# Altium schematic symbol library Power_vac.SCHLIB: 48 symbols
Pins are listed as number, name and electrical type; pins without a type are passive.

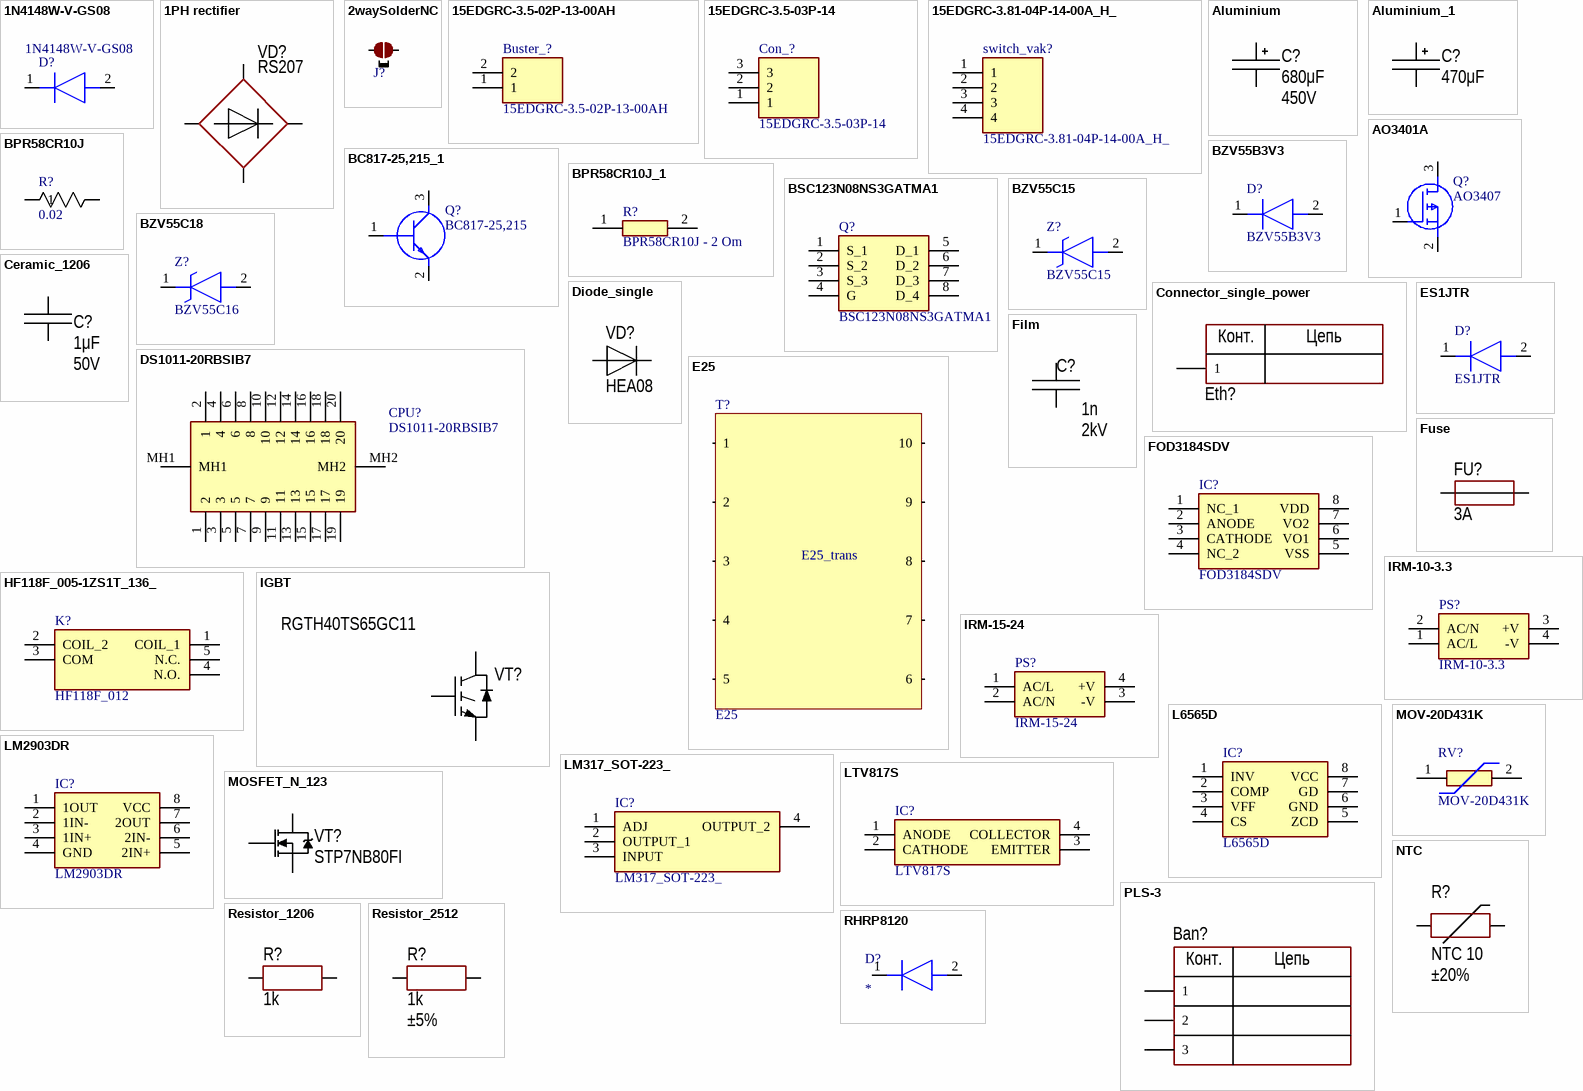
[diagram p0: symbols 1N4148W-V-GS08 to RHRP8120]

## 1N4148W-V-GS08
designator D?
Diode; Manufacturer_Name: Vishay; Datasheet Link: https://us.rs-online.com/m/d/a2789c8794cb0c42ced29f2dd8571f3c.pdf; Height: 1.35mm; Manufacturer_Part_Number: 1N4148W-V-GS08; Mouser Part Number: 625-1N4148W-V; Mouser Price/Stock: https://www.mouser.co.uk/ProductDetail/Vishay-Semiconductors/1N4148W-V-GS08?qs=TNTIDjy6APrS%2Fdgq1RSs3A%3D%3D; Arrow Part Number: 1N4148W-V-GS08; Arrow Price/Stock: https://www.arrow.com/en/products/1n4148w-v-gs08/vishay
footprint 1N4148WVGS08
pins: 1 K, 2 A

## 1PH rectifier
designator VD?  PartNumber: RS207
Manufacturer: Comchip Technology; ValueManufacturerPartNumber: Single phase rectifier, 600V, 2A, 1.1V, 4-SMD, -55...+150°C; TypeDiode: Single phase rectifier; Voltage: 600V; Current: 2A; VoltageDrop: 1.1V; Package: 4-SMD; HelpURL: https://www.digikey.com/product-detail/en/comchip-technology/DF206ST-G/641-1425-1-ND/2208797; Temperature: -55...+150°C
footprint DIODE: CD-MBL2
footprint DIODE: DF206S-G
footprint DIODE: GBU (SMD Diode Bridge)
footprint DIODE: KBU6M
footprint DIODE: GBU (90 deg) (SMD Diode Bridge)
pins: 1, 2, 3, 4

## 2waySolderNC
designator J?, comment 2 way net solder junction - Normally Connected  (value not drawn)  (no BOM)
ComponentLink1URL: http://www.edatools.cz/addons; ComponentLink1Description: Source
footprint 2waySolder_NC (2 way net solder junction - Normally Connected)
pins: 1, 2

## 15EDGRC-3.5-02P-13-00AH
designator Buster_?
Connector; Manufacturer_Name: Degson; Datasheet Link: https://www.tme.eu/Document/c7e2facf434c6541c93efde757aaf5e6/607.pdf; Height: 7mm; Manufacturer_Part_Number: 15EDGRC-3.5-02P-13-00AH
footprint 15EDGRC3502P1300AH
pins: 1, 2

## 15EDGRC-3.5-03P-14
designator Con_?
Connector; Manufacturer_Name: Degson; Datasheet Link: https://www.degson.com/content/details_552_4151737.html?lang=en; Height: 7.46mm; Manufacturer_Part_Number: 15EDGRC-3.5-03P-14
footprint 15EDGRC3503P14
pins: 1, 2, 3

## 15EDGRC-3.81-04P-14-00A_H_
designator switch_vak?
Connector; Manufacturer_Name: Degson; Manufacturer_Part_Number: 15EDGRC-3.81-04P-14-00A(H); Datasheet Link: https://datasheet.octopart.com/15EDGRC-3.81-04P-14-00A%28H%29-Degson-datasheet-17801160.pdf; Height: 7.54mm
footprint SHDRRA4W80P0X381_1X4_1603X920X754P
pins: 1, 2, 3, 4

## Aluminium
designator C?  value 680μF  Voltage: 450V
Manufacturer: Wurth; PartNumber: 860080475013; ValueManufacturerPartNumber: Aluminium capacitor, 680μF, 450V, ±20%, 54mOhm, 14x10x5 mm, -55...+105°C; TypeCapacitor: Aluminium capacitor; Tolerance: ±20%; Impedance: 54mOhm; Package: 14x10x5 mm; HelpURL: https://www.digikey.com/product-detail/en/wurth-electronics-inc/860080475013/732-9029-1-ND/5728972; Temperature: -55...+105°C
footprint CAP: D5C2H11
footprint CAP: D6.3C2.5H11
footprint CAP: D6.3C2.5H16
footprint CAP: D8C3.5H12
footprint CAP: D10C5H12.5
footprint CAP: D10C5H20
footprint CAP: D10C5H16
footprint CAP: D13C5H20
footprint CAP: D16C7.5H25
footprint CAP: D16C7.5H31.5
footprint CAP: D18C7.5H25
footprint CAP: D18C7.5H40
footprint CAP: D22C10H25
footprint CAP: D25C10H50
footprint CAP: D30C10H37
footprint CAP: D30C10.5H47
footprint CAP: D35C10H40
footprint CAP: D35C10.5H50
footprint CAP: SMD D6.3A6.6H7.7
footprint CAP: D18C7.5H32
footprint CAP: D18C7.5H32 (H)
pins: 1, 2

## Aluminium_1
designator C?  value 470μF
Manufacturer: Wurth; PartNumber: 860080475013; ValueManufacturerPartNumber: Aluminium capacitor, 470μF, 25V, ±20%, 54mOhm, 14x10x5 mm, -55...+105°C; TypeCapacitor: Aluminium capacitor; Tolerance: ±20%; Impedance: 54mOhm; Voltage: 25V; Package: 14x10x5 mm; HelpURL: https://www.digikey.com/product-detail/en/wurth-electronics-inc/860080475013/732-9029-1-ND/5728972; Temperature: -55...+105°C
footprint CAP: D5C2H11
footprint CAP: D6.3C2.5H11
footprint CAP: D6.3C2.5H16
footprint CAP: D8C3.5H12
footprint CAP: D10C5H12.5
footprint CAP: D10C5H20
footprint CAP: D10C5H16
footprint CAP: D13C5H20
footprint CAP: D16C7.5H25
footprint CAP: D16C7.5H31.5
footprint CAP: D18C7.5H25
footprint CAP: D18C7.5H40
footprint CAP: D22C10H25
footprint CAP: D25C10H50
footprint CAP: D30C10H37
footprint CAP: D30C10.5H47
footprint CAP: D35C10H40
footprint CAP: D35C10.5H50
footprint CAP: SMD D6.3A6.6H7.7
footprint CAP: D18C7.5H32
footprint CAP: D18C7.5H32 (H)
pins: 1, 2

## AO3401A
designator Q?, comment AO3407
MOSFET (P-Channel); Manufacturer_Name: Alpha & Omega Semiconductors; Manufacturer_Part_Number: AO3401A; Datasheet Link: http://www.aosmd.com/pdfs/datasheet/AO3401A.pdf; Height: 1.25mm; Arrow Part Number: AO3401A; Arrow Price/Stock: https://www.arrow.com/en/products/ao3401a/alpha-and-omega-semiconductor?utm_currency=USD&region=nac
footprint SOT95P280X125-3N
pins: 1 G, 2 S, 3 D

## BC817-25,215_1
designator Q?, comment BC817-25,215
Transistor BJT NPN; Manufacturer_Name: Nexperia; Datasheet Link: https://assets.nexperia.com/documents/data-sheet/BC817_SER.pdf; Height: 1.1mm; Manufacturer_Part_Number: BC817-25,215; Mouser Part Number: 771-BC817-25-T/R; Mouser Price/Stock: https://www.mouser.co.uk/ProductDetail/Nexperia/BC817-25215?qs=me8TqzrmIYUj67JkTBzlfg%3D%3D; Arrow Part Number: BC817-25,215; Arrow Price/Stock: https://www.arrow.com/en/products/bc817-25215/nexperia?region=nac
footprint BC81725215
pins: 1 B, 2 E, 3 C

## BPR58CR10J
designator R?, comment 0.02
No Description Available; Manufacturer_Name: KOA Speer; Manufacturer_Part_Number: BPR58CR10J; Type: Through Hole Resistors; Copyright: Copyright (C) 2026 Ultra Librarian. All rights reserved.
footprint RES_BPR58-STRAIGHT_KOA
pins: 1, 2

## BPR58CR10J_1
designator R?, comment BPR58CR10J - 2 Om
Resistor; Manufacturer_Name: KOA Speer; Datasheet Link: https://www.koaspeer.com/catimages/Products/BPR/BPR.pdf; Height: 19mm; Manufacturer_Part_Number: BPR58CR10J; Mouser Part Number: 660-BPR58CR10J; Mouser Price/Stock: https://www.mouser.co.uk/ProductDetail/KOA-Speer/BPR58CR10J?qs=c3C3yipULq1EyCkbnj3nTQ%3D%3D; Arrow Part Number: BPR58CR10J; Arrow Price/Stock: https://www.arrow.com/en/products/bpr58cr10j/koa-speer-electronics.html?utm_currency=USD&region=nac
footprint BPR58CR10J
pins: 1, 2

## BSC123N08NS3GATMA1
designator Q?
MOSFET (N-Channel); Manufacturer_Name: Infineon; Datasheet Link: https://www.infineon.com/dgdl/Infineon-BSC123N08NS3G-DS-v02_05-en.pdf?fileId=db3a30431add1d95011ae80eb8555625; Manufacturer_Part_Number: BSC123N08NS3GATMA1; Mouser Part Number: 726-BSC123N08NS3GATM; Mouser Price/Stock: https://www.mouser.co.uk/ProductDetail/Infineon-Technologies/BSC123N08NS3GATMA1?qs=K00xGehIljtQ0xUH5qROpA%3D%3D; Arrow Part Number: BSC123N08NS3GATMA1; Arrow Price/Stock: https://www.arrow.com/en/products/bsc123n08ns3gatma1/infineon-technologies-ag.html?utm_currency=USD&region=asia
footprint PG-TDSON-8
pins: 1 S_1, 2 S_2, 3 S_3, 4 G, 5 D_1, 6 D_2, 7 D_3, 8 D_4

## BZV55B3V3
designator D?
Diode; Manufacturer_Name: Nexperia; Datasheet Link: https://assets.nexperia.com/documents/data-sheet/BZV55_SER.pdf; Height: 1.6mm; Manufacturer_Part_Number: BZV55B3V3
footprint BZV55B3V3
pins: 1 K, 2 A

## BZV55C15
designator Z?
Zener Diode; Manufacturer_Name: Microsemi Corporation; Datasheet Link: https://www.mouser.com/datasheet/2/268/BZV55_C2V4_C75-1593780.pdf; Manufacturer_Part_Number: BZV55C15; Mouser Part Number: 494-BZV55C15; Mouser Price/Stock: https://www.mouser.co.uk/ProductDetail/Microchip-Microsemi/BZV55C15/?qs=TXMzd3F6Eykee5C9dglsnA%3D%3D; Arrow Part Number: BZV55C15; Arrow Price/Stock: https://www.arrow.com/en/products/bzv55c15/microsemi
footprint DO-213AA
pins: 1 K, 2 A

## BZV55C18
designator Z?, comment BZV55C16
Zener Diode; Manufacturer_Name: Microchip; Manufacturer_Part_Number: BZV55C18; Datasheet Link: https://www.microsemi.com/document-portal/doc_download/8298-bzv55-c2v4-c75-datasheet; Height: 1.7mm; Mouser Part Number: 494-BZV55C18; Mouser Price/Stock: https://www.mouser.co.uk/ProductDetail/Microchip-Technology/BZV55C18?qs=w%2Fv1CP2dgqosS2q5rh%252BhPQ%3D%3D; Arrow Part Number: BZV55C18; Arrow Price/Stock: https://www.arrow.com/en/products/bzv55c18/microchip-technology.html?utm_currency=USD&region=nac
footprint BZV55C18
pins: 1 K, 2 A

## Ceramic_1206
designator C?  value 1μF  Voltage: 50V
Manufacturer: Yageo; PartNumber: CC1206KRX7R9BB104; ValueManufacturerPartNumber: Ceramic capacitor, 1μF, X7R, ±10%, 50V, 1206, -55...+125°C; TypeCapacitor: Ceramic capacitor; Tolerance: ±10%; TypeDielectric: X7R; Package: 1206; HelpURL: https://www.digikey.com/product-detail/en/yageo/CC1206KRX7R9BB104/311-1179-1-ND/303089; Temperature: -55...+125°C
footprint CAP: 1206
pins: 1, 2

## Connector_single_power
designator Eth?
ValueManufacturerPartNumber: Power connector, *, *; TypeConnector: Power connector; CommentText: "Разъем"; Manufacturer: *; HelpURL: *; PartNumber: *; VoltageMax: *; CurrentMax: *
footprint CON: 7781
footprint CON: 8191
footprint CON: 7461057
footprint CON: 7461097
footprint CON: 7466005R
footprint CON: TH 1mm
footprint CON: TH 2mm
footprint CON: TH 3.5mm
footprint CON: Tyco 62650-1
pins: 1
text: Конт.; Цепь

## Diode_single
designator VD?  PartNumber: HEA08
Manufacturer: Micro Commercial; ValueManufacturerPartNumber: Single diode, 75V, 150mA, 1V, 4ns, SOD-323, -55...+150°C; TypeDiode: Single diode; Voltage: 75V; Current: 150mA; VoltageDrop: 1V; RecoveryTime: 4ns; Package: SOD-323; HelpURL: https://www.digikey.com/product-detail/en/micro-commercial-co/1N4148WX-TP/1N4148WXTPMSCT-ND/717312; Temperature: -55...+150°C
footprint DIODE: SMA
footprint DIODE: SMB
footprint DIODE: SMC
footprint DIODE: SOD80
footprint DIODE: SOD123
footprint DIODE: SOD123F
footprint DIODE: SOD123W
footprint DIODE: SOD323
footprint DIODE: SOD523
footprint TO220(D)
footprint TO220(DH)
footprint TO247(D) (3-Lead Plastic TO-247)
footprint DPAK (D)
pins: 1, 2

## DS1011-20RBSIB7
designator CPU?
Connector; Manufacturer_Name: Connfly; Datasheet Link: https://www.tme.com/Document/a911e76bcf9b13f23ffda9abd299f5e3/DS1011.pdf; Height: 8.7mm; Manufacturer_Part_Number: DS1011-20RBSIB7
footprint DS101120RBSIB7
pins: 1 2, 2 1, 3, 4, 5, 6, 7, 8, 9, 10, 11, 12, 13, 14, 15, 16, 17, 18, 19, 20, MH1, MH2

## E25
designator T?
footprint E25
pins: 1, 2, 3, 4, 5, 6, 7, 8, 9, 10
text: E25_trans

## ES1JTR
designator D?
Diode; Manufacturer_Name: SMC Diode Solutions; Datasheet Link: http://www.smc-diodes.com/propdf/ES1(A-M)%20N0159%20REV.E.pdf; Height: 2.95mm; Manufacturer_Part_Number: ES1JTR
footprint DIOM5226X295N
pins: 1 K, 2 A

## Film
designator C?  value 1n  Voltage: 2kV
Manufacturer: Epcos; PartNumber: B32774D4106K000; ValueManufacturerPartNumber: Film capacitor, 1n, 2kV, ±10%, 10.9mOhm, 31.5x15 mm, -40...+105°C; TypeCapacitor: Film capacitor; Tolerance: ±10%; Impedance: 10.9mOhm; Package: 31.5x15 mm; HelpURL: https://www.digikey.com/products/en/capacitors/film-capacitors/62?k=&pkeyword=&sv=0&pv2097=1958&sf=0&FV=fffc01ef%2C1f140000%2Cffe0003e%2Cffec6366&quantity=1&ColumnSort=1000011&page=1&stock=1&pageSize=25; Temperature: -40...+105°C
footprint CAP: AY2102M29Y5US63L7
footprint CAP: B32521
footprint CAP: B32522
footprint CAP: B32653A
footprint CAP: B32654
footprint CAP: B32674
footprint CAP: B32676
footprint CAP: B32774D (w=15mm)
footprint CAP: B32774D (w=22mm)
footprint CAP: MKP1848S
footprint CAP: VY2
footprint CAP: PHE845VD5220MR30L2
footprint CAP: B32923 (26.5x12x22 mm)
footprint CAP: B32021 (13x5x10 mm)
footprint CAP: B32922 (18x5x15 mm)
footprint CAP: B32922 (18x7x12.5mm)
footprint CAP: FKP2 (W=4.5MM)
footprint CAP: FKP2 (W=5.5MM)
footprint CAP: MKS2 (W=2.50MM)
footprint CAP: MKS2 (W=3.50MM)
pins: 1, 2

## FOD3184SDV
designator IC?
Integrated Circuit; Manufacturer_Name: onsemi; Datasheet Link: https://www.arrow.com/en/products/fod3184sdv/on-semiconductor; Height: 5.08mm; Manufacturer_Part_Number: FOD3184SDV; Mouser Part Number: 512-FOD3184SDV; Mouser Price/Stock: https://www.mouser.co.uk/ProductDetail/onsemi-Fairchild/FOD3184SDV?qs=GCVmsggAYMRSO6%252BIR7fWEw%3D%3D; Arrow Part Number: FOD3184SDV; Arrow Price/Stock: https://www.arrow.com/en/products/fod3184sdv/on-semiconductor?region=nac
footprint SOP254P1030X508-8N
pins: 1 NC_1, 2 ANODE, 3 CATHODE, 4 NC_2, 5 VSS, 6 VO1, 7 VO2, 8 VDD

## Fuse
designator FU?  MaxCurrent: 3A
Manufacturer: Littelfuse; PartNumber: 01110501Z; TypeFuse: Electromechanics relay; VoltageMax: 250VAC; Package: 5x20mm; HelpURL: https://www.digikey.com/products/en?keywords=01110501Z; ValueManufacturerPartNumber: =TypeFuse+', '+VoltageMax+', '+MaxCurrent+', '+Package+', '+Temperature
footprint FUSE: 0ADBP3000-RE
footprint FUSE: 0679H (BelFuse)
footprint FUSE: 01110501Z (5x20 mm)
footprint FUSE: CQ-216
footprint FUSE: FC-001S
footprint FUSE: FH-100 (5x20 mm)
footprint FUSE: FH-101 (Fuse connector PCB mount)
footprint FUSE: 1206
footprint FUSE: 1812
footprint FUSE: 0603
pins: 1, 2

## HF118F_005-1ZS1T_136_
designator K?, comment HF118F_012
Relay or Contactor; Manufacturer_Name: Hongfa; Manufacturer_Part_Number: HF118F/005-1ZS1T(136); Height: 12.8mm
footprint HF118F0051ZS1T136
pins: 1 COIL_1, 2 COIL_2, 3 COM, 4 N.O., 5 N.C.

## IGBT
designator VT?  PartNumber: RGTH40TS65GC11
Manufacturer: Rohm Semiconductor; ValueManufacturerPartNumber: IGBT transistor, 650V, 40A, 40nC, 144W, 2.1V, 22ns/73ns, TO247, -55...+125°C; TypeTransistor: IGBT transistor; VoltageCE: 650V; CurrentCE: 40A; VoltageSaturation: 2.1V; GateCharge: 40nC; TimeOnOff: 22ns/73ns; MaxPower: 144W; Package: TO247; HelpURL: https://www.digikey.com/product-detail/en/rohm-semiconductor/RGTH40TS65GC11/RGTH40TS65GC11-ND/5029953; Temperature: -55...+125°C
footprint TO220
footprint TO220(H)
footprint TO247 (3-Lead Plastic TO-247)
footprint TO247(H) (3-Lead Plastic TO-247)
pins: 1 G, 2 C, 3 E

## IRM-10-3.3
designator PS?
Power Supply; Manufacturer_Name: Mean Well; Datasheet Link: https://datasheet.datasheetarchive.com/originals/distributors/DKDS-14/277831.pdf; Height: 21.5mm; Manufacturer_Part_Number: IRM-10-3.3; Mouser Part Number: 709-IRM10-3.3; Mouser Price/Stock: https://www.mouser.co.uk/ProductDetail/MEAN-WELL/IRM-10-3.3?qs=WkdRfq4wf1M%252Ba4IjD903Hw%3D%3D; Arrow Part Number: IRM-10-3.3; Arrow Price/Stock: https://www.arrow.com/en/products/irm-10-3.3/mean-well-enterprises?region=nac
footprint IRM1033
pins: 1 AC/L, 2 AC/N, 3 +V, 4 -V

## IRM-15-24
designator PS?
Power Supply; Manufacturer_Name: Mean Well; Datasheet Link: https://componentsearchengine.com/Datasheets/2/IRM-15-24.pdf; Manufacturer_Part_Number: IRM-15-24; Mouser Part Number: 709-IRM15-24; Mouser Price/Stock: https://www.mouser.co.uk/ProductDetail/MEAN-WELL/IRM-15-24?qs=WkdRfq4wf1PZSEWhZtKDbQ%3D%3D; Arrow Part Number: IRM-15-24; Arrow Price/Stock: https://www.arrow.com/en/products/irm-15-24/mean-well-enterprises?utm_currency=USD&region=europe
footprint IRM-15-5
pins: 1 AC/L, 2 AC/N, 3 -V, 4 +V

## L6565D
designator IC?
Integrated Circuit; Manufacturer_Name: STMicroelectronics; Datasheet Link: https://www.st.com/resource/en/datasheet/l6565.pdf; Height: 1.75mm; Manufacturer_Part_Number: L6565D; Mouser Part Number: 511-L6565D; Mouser Price/Stock: https://www.mouser.co.uk/ProductDetail/STMicroelectronics/L6565D/?qs=sps7W%2FwBcGGH47tz0cin9g%3D%3D; Arrow Part Number: L6565D; Arrow Price/Stock: https://www.arrow.com/en/products/l6565d/stmicroelectronics
footprint SOIC127P600X175-8N
pins: 1 INV, 2 COMP, 3 VFF, 4 CS, 5 ZCD, 6 GND, 7 GD, 8 VCC

## LM317_SOT-223_
designator IC?
Integrated Circuit; Manufacturer_Name: Changjiang Electronics Tech (CJ); Manufacturer_Part_Number: LM317(SOT-223); Datasheet Link: https://www.jscj-elec.com/gallery//file/LM317%20SOT-223%20%20V2.0.pdf; Height: 1.8mm
footprint SOT230P700X180-4N
pins: 1 ADJ, 2 OUTPUT_1, 3 INPUT, 4 OUTPUT_2

## LM2903DR
designator IC?
Integrated Circuit; Manufacturer_Name: Texas Instruments; Datasheet Link: http://www.ti.com/lit/ds/symlink/lm393.pdf; Height: 1.75mm; Manufacturer_Part_Number: LM2903DR; Mouser Part Number: 595-LM2903DR; Mouser Price/Stock: https://www.mouser.co.uk/ProductDetail/Texas-Instruments/LM2903DR?qs=6aLkNDRfRUZTZwd6enMTiA%3D%3D; Arrow Part Number: LM2903DR; Arrow Price/Stock: https://www.arrow.com/en/products/lm2903dr/texas-instruments?region=nac
footprint SOIC127P600X175-8N
pins: 1 1OUT, 2 1IN-, 3 1IN+, 4 GND, 5 2IN+, 6 2IN-, 7 2OUT, 8 VCC

## LTV817S
designator IC?
Integrated Circuit; Manufacturer_Name: Lite-On; Datasheet Link: https://www.arrow.com/en/products/ltv-817s/lite-on-technology; Height: 4.6mm; Manufacturer_Part_Number: LTV817S; Arrow Part Number: LTV817S; Arrow Price/Stock: https://www.arrow.com/en/products/ltv-817s/lite-on-technology
footprint SOP254P1016X460-4N
pins: 1 ANODE, 2 CATHODE, 3 EMITTER, 4 COLLECTOR

## MOSFET_N_123
designator VT?  PartNumber: STP7NB80FI
Manufacturer: Infineon Technologies; ValueManufacturerPartNumber: MOSFET N-channel transistor, 80V, 7A, 9.1nC, 2.5W, 34mOhm, 756pF, 8-TDSON, -55...+150°C; TypeTransistor: MOSFET N-channel transistor; VoltageDS: 80V; CurrentDS: 7A; RDS: 34mOhm; GateCharge: 9.1nC; InputCapacitor: 756pF; MaxPower: 2.5W; Package: 8-TDSON; HelpURL: https://www.digikey.com/product-detail/en/infineon-technologies/BSC340N08NS3GATMA1/BSC340N08NS3GATMA1TR-ND/2080655; Temperature: -55...+150°C
footprint SOT23
footprint TO220
footprint TO220(H)
footprint TO247 (3-Lead Plastic TO-247)
footprint TO247(H) (3-Lead Plastic TO-247)
footprint HSOF-8-1 (8-HSOF)
footprint 8-TDSON (pitch 1.3 mm, power pad)
footprint D2PAK
footprint DPAK
footprint SC-70
footprint 8-PowerWDFN
pins: 1 G, 2 D, 3 S

## MOV-20D431K
designator RV?
Varistor; Manufacturer_Name: Bourns; Datasheet Link: https://www.bourns.com/data/global/pdfs/MOV20D.pdf; Height: 26mm; Manufacturer_Part_Number: MOV-20D431K; Mouser Part Number: 652-MOV-20D431K; Mouser Price/Stock: https://www.mouser.co.uk/ProductDetail/Bourns/MOV-20D431K?qs=CQ3B1E%252BbPs2R73OUL4kc5g%3D%3D; Arrow Part Number: MOV-20D431K; Arrow Price/Stock: https://www.arrow.com/en/products/mov-20d431k/bourns?utm_currency=USD&region=nac
footprint MOV20D431K
pins: 1, 2

## NTC
designator R?  value NTC 10  Tolerance: ±20%
Manufacturer: Epcos; PartNumber: B57237S229M54; ValueManufacturerPartNumber: NTC resistor, NTC 10, ±20%, pitch 7.5mm, 7A, -55...+125°C; TypeResistor: NTC resistor; MaxCurrent: 7A; Package: pitch 7.5mm; HelpURL: https://www.digikey.com/product-detail/en/epcos-tdk/B57237S229M54/495-76635-1-ND/8126375; Temperature: -55...+125°C
footprint RES: 0201
footprint RES: 0402
footprint RES: 0603
footprint RES: 0805
footprint RES: 1206
footprint RES: B57237 (NTC)
pins: 1, 2

## PLS-3
designator Ban?
Manufacturer: Connfly; ValueManufacturerPartNumber: Connector, 3pin, 2.54mm, 500VAC, 3A; PartNumber: PLS-3; TypeConnector: Connector; VoltageMax: 500VAC; Pitch: 2.54mm; CurrentMax: 3A; Multichannel: 3pin; CommentText: "Разъем"; HelpURL: https://www.chipdip.ru/product/pls-3
footprint CON: PLS-3
pins: 1, 2, 3 (power)
text: Конт.; Цепь

## Resistor_1206
designator R?  value 1k
Manufacturer: Yageo; PartNumber: RC1206JR-07100RL; ValueManufacturerPartNumber: Resistor film, 1k, ±5%, 1206, 0.25W, -55...+125°C; TypeResistor: Resistor film; Power: 0.25W; Tolerance: ±5%; Package: 1206; HelpURL: https://www.digikey.com/product-detail/en/yageo/RC1206JR-07100RL/311-100ERCT-ND/732153; Temperature: -55...+125°C
footprint RES: 1206
pins: 1, 2

## Resistor_2512
designator R?  value 1k  Tolerance: ±5%
Manufacturer: Yageo; PartNumber: RC2512JK-07100RL; ValueManufacturerPartNumber: Resistor film, 1k, ±5%, 2512, 1W, -55...+125°C; TypeResistor: Resistor film; Power: 1W; Package: 2512; HelpURL: https://www.digikey.com/product-detail/en/yageo/RC2512JK-07100RL/YAG3393CT-ND/5962215; Temperature: -55...+125°C
footprint RES: 2512
pins: 1, 2

## RHRP8120
designator D?
Diode; Manufacturer_Name: onsemi; Manufacturer_Part_Number: RHRP8120; Datasheet Link: https://www.onsemi.com/pub/Collateral/RHRP8120-D.PDF; Height: 4.672mm; Mouser Part Number: 512-RHRP8120; Mouser Price/Stock: https://www.mouser.co.uk/ProductDetail/onsemi-Fairchild/RHRP8120?qs=UeXq8qLVREGknIOnwE%2FlEA%3D%3D; Arrow Part Number: RHRP8120; Arrow Price/Stock: https://www.arrow.com/en/products/rhrp8120/on-semiconductor
footprint TO508P467X1023X1923-2P
pins: 1 K, 2 A

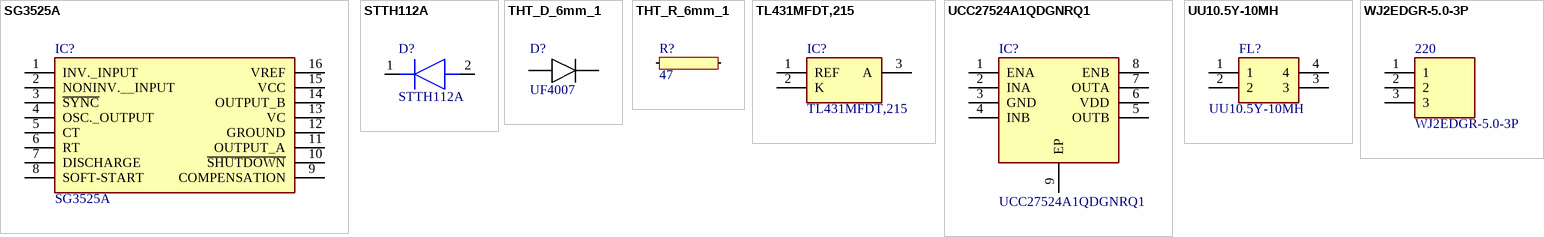
[diagram p1: symbols SG3525A to WJ2EDGR-5.0-3P]

## SG3525A
designator IC?
Integrated Circuit; Manufacturer_Name: onsemi; Datasheet Link: https://www.onsemi.com/pub/Collateral/SG3525A-D.PDF; Height: 2.65mm; Manufacturer_Part_Number: SG3525A; Mouser Part Number: N/A; Mouser Price/Stock: https://www.mouser.co.uk/ProductDetail/onsemi/SG3525A?qs=%252BEew9%252B0nqrDSSy3t2TCw8g%3D%3D
footprint SOIC127P1030X265-16N
pins: 1 INV._INPUT, 2 NONINV.__INPUT, 3 ~{SYNC}, 4 OSC._OUTPUT, 5 CT, 6 RT, 7 DISCHARGE, 8 SOFT-START, 9 COMPENSATION, 10 ~{SHUTDOWN}, 11 OUTPUT_A, 12 GROUND, 13 VC, 14 OUTPUT_B, 15 VCC, 16 VREF

## STTH112A
designator D?
Diode; Manufacturer_Name: STMicroelectronics; Datasheet Link: https://www.st.com/resource/en/datasheet/stth112.pdf; Height: 2.65mm; Manufacturer_Part_Number: STTH112A; Mouser Part Number: 511-STTH112A; Mouser Price/Stock: https://www.mouser.co.uk/ProductDetail/STMicroelectronics/STTH112A?qs=1X0wRT6hCqH%2F7s%2FmzYZuyg%3D%3D; Arrow Part Number: STTH112A; Arrow Price/Stock: https://www.arrow.com/en/products/stth112a/stmicroelectronics.html?utm_currency=USD&region=nac
footprint DIOM5126X265N
pins: 1 K, 2 A

## THT_D_6mm_1
designator D?, comment UF4007
footprint THT_D_6mm_1
pins: 1, 2

## THT_R_6mm_1
designator R?, comment 47
footprint THT_R_6mm_1
pins: 1, 2

## TL431MFDT,215
designator IC?
Integrated Circuit; Manufacturer_Name: Nexperia; Datasheet Link: https://assets.nexperia.com/documents/data-sheet/TL431_FAM.pdf; Height: 1.1mm; Manufacturer_Part_Number: TL431MFDT,215; Mouser Part Number: 771-TL431MFDT215; Mouser Price/Stock: https://www.mouser.co.uk/ProductDetail/Nexperia/TL431MFDT215?qs=A1cBxND5mHKvFzVl3lBdcQ%3D%3D; Arrow Part Number: TL431MFDT,215; Arrow Price/Stock: https://www.arrow.com/en/products/tl431mfdt215/nexperia?utm_currency=USD&region=nac
footprint SOT95P230X110-3N
pins: 1 REF, 2 K, 3 A

## UCC27524A1QDGNRQ1
designator IC?
Integrated Circuit; Manufacturer_Name: Texas Instruments; Datasheet Link: http://www.ti.com/lit/gpn/ucc27524a1-q1; Height: 1.1mm; Manufacturer_Part_Number: UCC27524A1QDGNRQ1; Mouser Part Number: 595-CC27524A1QDGNRQ1; Mouser Price/Stock: https://www.mouser.co.uk/ProductDetail/Texas-Instruments/UCC27524A1QDGNRQ1?qs=5aG0NVq1C4zKCNInVyVkfw%3D%3D; Arrow Part Number: UCC27524A1QDGNRQ1; Arrow Price/Stock: https://www.arrow.com/en/products/ucc27524a1qdgnrq1/texas-instruments.html?utm_currency=USD&region=nac
footprint SOP65P490X110-9N
pins: 1 ENA, 2 INA, 3 GND, 4 INB, 5 OUTB, 6 VDD, 7 OUTA, 8 ENB, 9 EP

## UU10.5Y-10MH
designator FL?
Filter; Manufacturer_Name: FH(Guangdong Fenghua Advanced Tech); Datasheet Link: https://datasheet.lcsc.com/lcsc/2304140030_FH--Guangdong-Fenghua-Advanced-Tech-UU10-5Y-10mH_C75196.pdf; Height: 17mm; Manufacturer_Part_Number: UU10.5Y-10MH
footprint UU105Y10MH
pins: 1, 2, 3, 4

## WJ2EDGR-5.0-3P
designator 220
Connector; Manufacturer_Name: Ningbo Kangnex; Datasheet Link: https://datasheet.lcsc.com/lcsc/1912251636_Ningbo-Kangnex-Elec-WJ2EDGR-5-0-3P_C8480.pdf; Height: 8.4mm; Manufacturer_Part_Number: WJ2EDGR-5.0-3P
footprint WJ2EDGR503P
pins: 1, 2, 3